# Altium schematic symbol library Potentiometer.SchLib: 2 symbols
Pins are listed as number, name and electrical type; pins without a type are passive.

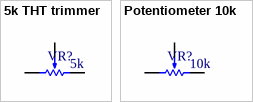
[diagram p0: symbols 5k THT trimmer to Potentiometer 10k]

## 5k THT trimmer
designator VR?, comment value 5k  (hidden comment: RKT6V-5K)
footprint SRpassives RKT6V-5K
pins: 1, 2, 3

## Potentiometer 10k
designator VR?, comment value 10k  (hidden comment: ALPSALPINE RK09K11300DR)
footprint ALPSALPINE RK09K11300DR (10k vertical potentiometer)
pins: 1, 2, 3